# Altium footprint library ISOW1432DFMR.PcbLib: 3 footprints
Each footprint in its own frame and in the unit in brackets; x right, y up, seen from the top. Pads: shape width x height; smd on the part's side, far side on the other; paste and mask are expansions set on the pad; w line width, h text height; cw(c..) or ccw(c..) is an arc to the next point about the centre after c.
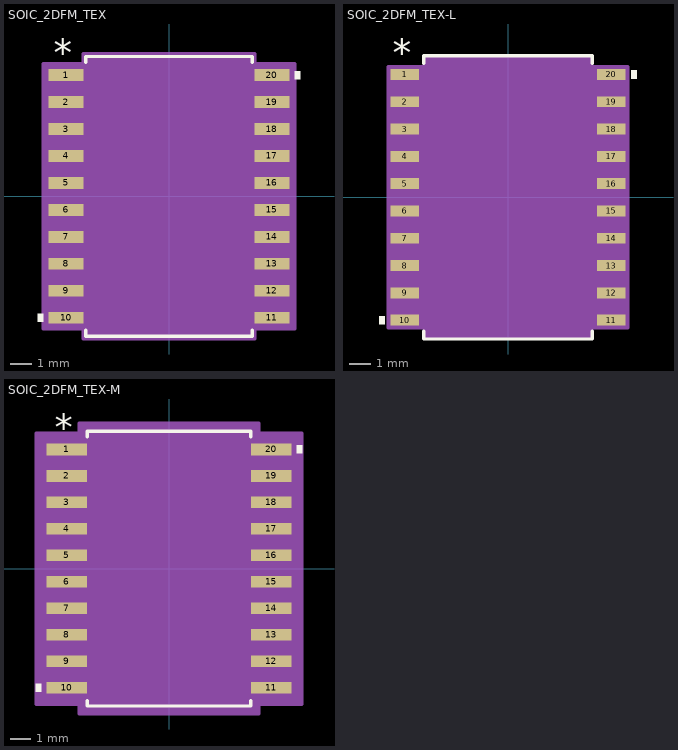
[diagram p0: the footprints below, top view; thin cyan lines are the x and y axes]

## SOIC_2DFM_TEX [mil]
pads (20):
  rect 64.56x21.97 smd paste+0 mask+0: 1(-191,225) 2(-191,175) 3(-191,125) 4(-191,75) 5(-191,25) 6(-191,-25) 7(-191,-75) 8(-191,-125) 9(-191,-175) 10(-191,-225) 11(191,-225) 12(191,-175) 13(191,-125) 14(191,-75) 15(191,-25) 16(191,25) 17(191,75) 18(191,125) 19(191,175) 20(191,225)
Top Overlay:
  region: -233.28,-217.5 -243.28,-217.5 -243.28,-232.5 -233.28,-232.5
  region: 233.28,232.5 243.28,232.5 243.28,217.5 233.28,217.5
  lines w6: -154.5,-248.39 -154.5,-259.5 154.5,-259.5 154.5,-248.39 ; -154.5,248.39 -154.5,259.5 154.5,259.5 154.5,248.39
  text "*" at -213.5,241.97 h50
  text ".Designator" at -137.5,-25 h47.24
Mechanical 13:
  lines w1: -12,254.5 ccw(c0,254.5) 12,254.5 ; -209.5,-235 -209.5,-215 -149.5,-215 -149.5,-235 -209.5,-235 ; -209.5,-185 -209.5,-165 -149.5,-165 -149.5,-185 -209.5,-185 ; -209.5,-135 -209.5,-115 -149.5,-115 -149.5,-135 -209.5,-135 ; -209.5,-85 -209.5,-65 -149.5,-65 -149.5,-85 -209.5,-85 ; -209.5,-35 -209.5,-15 -149.5,-15 -149.5,-35 -209.5,-35 ; -209.5,15 -209.5,35 -149.5,35 -149.5,15 -209.5,15 ; -209.5,65 -209.5,85 -149.5,85 -149.5,65 -209.5,65 ; -209.5,115 -209.5,135 -149.5,135 -149.5,115 -209.5,115 ; -209.5,165 -209.5,185 -149.5,185 -149.5,165 -209.5,165 ; -209.5,215 -209.5,235 -149.5,235 -149.5,215 -209.5,215 ; -149.5,-254.5 149.5,-254.5 149.5,254.5 -149.5,254.5 -149.5,-254.5 ; 149.5,-235 149.5,-215 209.5,-215 209.5,-235 149.5,-235 ; 149.5,-185 149.5,-165 209.5,-165 209.5,-185 149.5,-185 ; 149.5,-135 149.5,-115 209.5,-115 209.5,-135 149.5,-135 ; 149.5,-85 149.5,-65 209.5,-65 209.5,-85 149.5,-85 ; 149.5,-35 149.5,-15 209.5,-15 209.5,-35 149.5,-35 ; 149.5,15 149.5,35 209.5,35 209.5,15 149.5,15 ; 149.5,65 149.5,85 209.5,85 209.5,65 149.5,65 ; 149.5,115 149.5,135 209.5,135 209.5,115 149.5,115 ; 149.5,165 149.5,185 209.5,185 209.5,165 149.5,165 ; 149.5,215 149.5,235 209.5,235 209.5,215 149.5,215
  text ".Designator" at -137.5,-25 h50
  text "*" at -147,201.5 h50
Mechanical 15:
  region: -159.5,-245.98 -233.28,-245.98 -233.28,245.98 -159.5,245.98 -159.5,264.5 159.5,264.5 159.5,245.98 233.28,245.98 233.28,-245.98 159.5,-245.98 159.5,-264.5 -159.5,-264.5
  lines w6: -233.28,-245.98 -233.28,245.98 -159.5,245.98 -159.5,264.5 159.5,264.5 159.5,245.98 233.28,245.98 233.28,-245.98 159.5,-245.98 159.5,-264.5 -159.5,-264.5 -159.5,-245.98 -233.28,-245.98
3D body "SOIC_2DFM_TEX.step": height 140.12, standoff 0, extent -209.49,-254.49 209.49,254.49

## SOIC_2DFM_TEX-L [mil]
pads (20):
  rect 52.75x20 smd paste+0 mask+0: 1(-189.03,225) 2(-189.03,175) 3(-189.03,125) 4(-189.03,75) 5(-189.03,25) 6(-189.03,-25) 7(-189.03,-75) 8(-189.03,-125) 9(-189.03,-175) 10(-189.03,-225) 11(189.03,-225) 12(189.03,-175) 13(189.03,-125) 14(189.03,-75) 15(189.03,-25) 16(189.03,25) 17(189.03,75) 18(189.03,125) 19(189.03,175) 20(189.03,225)
Top Overlay:
  region: -225.41,-217.5 -235.41,-217.5 -235.41,-232.5 -225.41,-232.5
  region: 225.41,232.5 235.41,232.5 235.41,217.5 225.41,217.5
  lines w6: -154.5,-245.25 -154.5,-259.5 154.5,-259.5 154.5,-245.25 ; -154.5,245.25 -154.5,259.5 154.5,259.5 154.5,245.25
  text "*" at -211.53,240 h50
  text ".Designator" at -137.5,-25 h47.24
Mechanical 13:
  lines w1: -12,254.5 ccw(c0,254.5) 12,254.5 ; -209.5,-235 -209.5,-215 -149.5,-215 -149.5,-235 -209.5,-235 ; -209.5,-185 -209.5,-165 -149.5,-165 -149.5,-185 -209.5,-185 ; -209.5,-135 -209.5,-115 -149.5,-115 -149.5,-135 -209.5,-135 ; -209.5,-85 -209.5,-65 -149.5,-65 -149.5,-85 -209.5,-85 ; -209.5,-35 -209.5,-15 -149.5,-15 -149.5,-35 -209.5,-35 ; -209.5,15 -209.5,35 -149.5,35 -149.5,15 -209.5,15 ; -209.5,65 -209.5,85 -149.5,85 -149.5,65 -209.5,65 ; -209.5,115 -209.5,135 -149.5,135 -149.5,115 -209.5,115 ; -209.5,165 -209.5,185 -149.5,185 -149.5,165 -209.5,165 ; -209.5,215 -209.5,235 -149.5,235 -149.5,215 -209.5,215 ; -149.5,-254.5 149.5,-254.5 149.5,254.5 -149.5,254.5 -149.5,-254.5 ; 149.5,-235 149.5,-215 209.5,-215 209.5,-235 149.5,-235 ; 149.5,-185 149.5,-165 209.5,-165 209.5,-185 149.5,-185 ; 149.5,-135 149.5,-115 209.5,-115 209.5,-135 149.5,-135 ; 149.5,-85 149.5,-65 209.5,-65 209.5,-85 149.5,-85 ; 149.5,-35 149.5,-15 209.5,-15 209.5,-35 149.5,-35 ; 149.5,15 149.5,35 209.5,35 209.5,15 149.5,15 ; 149.5,65 149.5,85 209.5,85 209.5,65 149.5,65 ; 149.5,115 149.5,135 209.5,135 209.5,115 149.5,115 ; 149.5,165 149.5,185 209.5,185 209.5,165 149.5,165 ; 149.5,215 149.5,235 209.5,235 209.5,215 149.5,215
  text ".Designator" at -137.5,-25 h50
  text "*" at -147,201.5 h50
Mechanical 15:
  region: -153.5,-239 -219.41,-239 -219.41,239 -153.5,239 -153.5,258.5 153.5,258.5 153.5,239 219.41,239 219.41,-239 153.5,-239 153.5,-258.5 -153.5,-258.5
  lines w6: -219.41,-239 -219.41,239 -153.5,239 -153.5,258.5 153.5,258.5 153.5,239 219.41,239 219.41,-239 153.5,-239 153.5,-258.5 -153.5,-258.5 -153.5,-239 -219.41,-239
3D body "SOIC_2DFM_TEX.step": height 140.12, standoff 0, extent -209.49,-254.49 209.49,254.49

## SOIC_2DFM_TEX-M [mil]
pads (20):
  rect 76.37x21.97 smd paste+0 mask+0: 1(-192.97,225) 2(-192.97,175) 3(-192.97,125) 4(-192.97,75) 5(-192.97,25) 6(-192.97,-25) 7(-192.97,-75) 8(-192.97,-125) 9(-192.97,-175) 10(-192.97,-225) 11(192.97,-225) 12(192.97,-175) 13(192.97,-125) 14(192.97,-75) 15(192.97,-25) 16(192.97,25) 17(192.97,75) 18(192.97,125) 19(192.97,175) 20(192.97,225)
Top Overlay:
  region: -241.15,-217.5 -251.15,-217.5 -251.15,-232.5 -241.15,-232.5
  region: 241.15,232.5 251.15,232.5 251.15,217.5 241.15,217.5
  lines w6: -154.5,-249.08 -154.5,-259.5 154.5,-259.5 154.5,-249.08 ; -154.5,249.08 -154.5,259.5 154.5,259.5 154.5,249.08
  text "*" at -215.47,241.97 h50
  text ".Designator" at -137.5,-25 h47.24
Mechanical 13:
  lines w1: -12,254.5 ccw(c0,254.5) 12,254.5 ; -209.5,-235 -209.5,-215 -149.5,-215 -149.5,-235 -209.5,-235 ; -209.5,-185 -209.5,-165 -149.5,-165 -149.5,-185 -209.5,-185 ; -209.5,-135 -209.5,-115 -149.5,-115 -149.5,-135 -209.5,-135 ; -209.5,-85 -209.5,-65 -149.5,-65 -149.5,-85 -209.5,-85 ; -209.5,-35 -209.5,-15 -149.5,-15 -149.5,-35 -209.5,-35 ; -209.5,15 -209.5,35 -149.5,35 -149.5,15 -209.5,15 ; -209.5,65 -209.5,85 -149.5,85 -149.5,65 -209.5,65 ; -209.5,115 -209.5,135 -149.5,135 -149.5,115 -209.5,115 ; -209.5,165 -209.5,185 -149.5,185 -149.5,165 -209.5,165 ; -209.5,215 -209.5,235 -149.5,235 -149.5,215 -209.5,215 ; -149.5,-254.5 149.5,-254.5 149.5,254.5 -149.5,254.5 -149.5,-254.5 ; 149.5,-235 149.5,-215 209.5,-215 209.5,-235 149.5,-235 ; 149.5,-185 149.5,-165 209.5,-165 209.5,-185 149.5,-185 ; 149.5,-135 149.5,-115 209.5,-115 209.5,-135 149.5,-135 ; 149.5,-85 149.5,-65 209.5,-65 209.5,-85 149.5,-85 ; 149.5,-35 149.5,-15 209.5,-15 209.5,-35 149.5,-35 ; 149.5,15 149.5,35 209.5,35 209.5,15 149.5,15 ; 149.5,65 149.5,85 209.5,85 209.5,65 149.5,65 ; 149.5,115 149.5,135 209.5,135 209.5,115 149.5,115 ; 149.5,165 149.5,185 209.5,185 209.5,165 149.5,165 ; 149.5,215 149.5,235 209.5,235 209.5,215 149.5,215
  text ".Designator" at -137.5,-25 h50
  text "*" at -147,201.5 h50
Mechanical 15:
  region: -169.5,-255.98 -251.15,-255.98 -251.15,255.98 -169.5,255.98 -169.5,274.5 169.5,274.5 169.5,255.98 251.15,255.98 251.15,-255.98 169.5,-255.98 169.5,-274.5 -169.5,-274.5
  lines w6: -251.15,-255.98 -251.15,255.98 -169.5,255.98 -169.5,274.5 169.5,274.5 169.5,255.98 251.15,255.98 251.15,-255.98 169.5,-255.98 169.5,-274.5 -169.5,-274.5 -169.5,-255.98 -251.15,-255.98
3D body "SOIC_2DFM_TEX.step": height 140.12, standoff 0, extent -209.49,-254.49 209.49,254.49